# Altium footprint library 2019-10-13_10-42-52.PcbLib: 3 footprints
Each footprint in its own frame and in the unit in brackets; x right, y up, seen from the top. Pads: shape width x height; smd on the part's side, far side on the other; paste and mask are expansions set on the pad; w line width, h text height; cw(c..) or ccw(c..) is an arc to the next point about the centre after c.
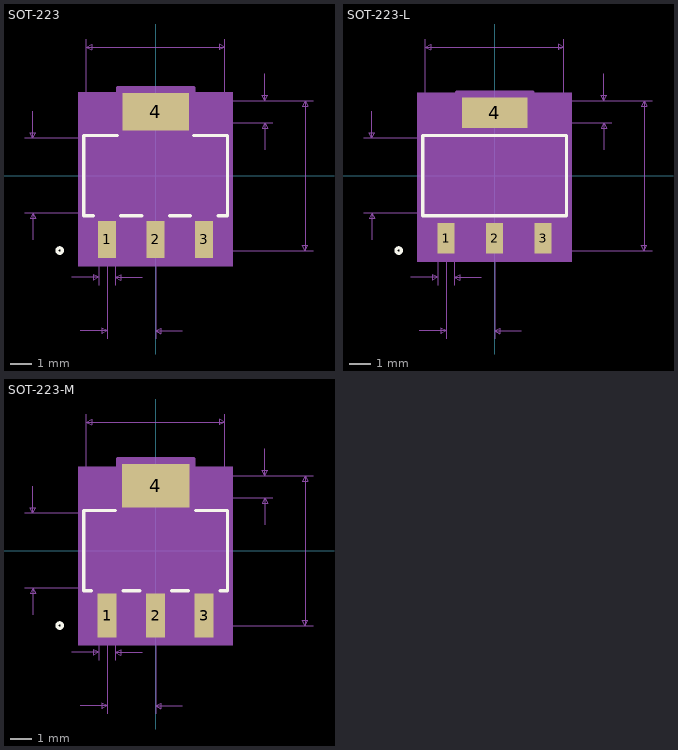
[diagram p0: the footprints below, top view; thin cyan lines are the x and y axes]

## SOT-223 [mm]
pads (4):
  rect 0.851x1.761 smd paste+0 mask+0: 1(-2.3,-3.025) 2(0,-3.025) 3(2.3,-3.025)
  rect 3.151x1.761 smd paste+0 mask+0: 4(0,3.025)
Top Overlay:
  circle w0.152: c-4.545,-3.55 r0.127
  lines w0.152: -2.953,-1.902 -3.402,-1.902 -3.402,1.902 -1.803,1.902 ; -1.647,-1.902 -0.653,-1.902 ; 0.653,-1.902 1.647,-1.902 ; 1.803,1.902 3.402,1.902 3.402,-1.902 2.953,-1.902
Mechanical 5:
  region: -3.656,3.956 3.656,3.956 3.656,-4.287 -3.656,-4.287
Mechanical 7:
  lines w0.025: -6.196,-1.775 0,-1.775 ; -6.196,1.775 0,1.775 ; -5.815,-3.045 -5.815,-1.775 ; -5.815,3.045 -5.815,1.775 ; -3.97,-4.82 -2.7,-4.82 ; -3.57,-7.36 -2.3,-7.36 ; -3.275,1.775 -3.275,6.471 ; -2.7,-5.201 -2.7,-3.55 ; -2.3,-7.741 -2.3,-3.55 ; -1.9,-5.201 -1.9,-3.55 ; -0.63,-4.82 -1.9,-4.82 ; 0,-7.741 0,-3.55 7.466,-3.55 ; 0,2.5 5.561,2.5 ; 1.27,-7.36 0,-7.36 ; 3.275,1.775 3.275,6.471 ; 5.18,1.23 5.18,2.5 ; 5.18,4.82 5.18,3.55 ; 5.561,3.55 0,3.55 7.466,3.55 ; -5.815,-1.775 -5.942,-2.029 -5.688,-2.029 -5.815,-1.775 ; -5.815,1.775 -5.942,2.029 -5.688,2.029 -5.815,1.775 ; -3.275,6.09 3.275,6.09 ; -3.275,6.09 -3.021,6.217 -3.021,5.963 -3.275,6.09 ; -2.7,-4.82 -2.954,-4.693 -2.954,-4.947 -2.7,-4.82 ; -2.3,-7.36 -2.554,-7.233 -2.554,-7.487 -2.3,-7.36 ; -1.9,-4.82 -1.646,-4.693 -1.646,-4.947 -1.9,-4.82 ; 0,-7.36 0.254,-7.233 0.254,-7.487 0,-7.36 ; 3.275,6.09 3.021,6.217 3.021,5.963 3.275,6.09 ; 5.18,2.5 5.053,2.246 5.307,2.246 5.18,2.5 ; 5.18,3.55 5.053,3.804 5.307,3.804 5.18,3.55 ; 7.085,-3.55 7.085,3.55 ; 7.085,-3.55 6.958,-3.296 7.212,-3.296 7.085,-3.55 ; 7.085,3.55 6.958,3.296 7.212,3.296 7.085,3.55
  text "Default Pin Padstyle: RX33p5Y69p34D0T" at -11.747,-11.526 h1.27
  text "Alt 1 Padstyle: OX60Y90D30P" at -8.572,-12.796 h1.27
  text "Alt 2 Padstyle: OX90Y60D30P" at -8.572,-14.066 h1.27
  text "0.28in/7.1mm" at 7.593,-0.318 h0.64
  text "0.041in/1.05mm" at 5.688,2.708 h0.64
  text "0.091in/2.3mm" at -3.214,-8.503 h0.64
  text "0.031in/0.8mm" at -4.364,-5.963 h0.64
  text "0.258in/6.55mm" at -2.222,6.598 h0.64
  text "0.14in/3.55mm" at -10.45,-0.318 h0.64
Mechanical 13:
  circle w0: c-3.021,-1.521 r0.127
  lines w0.025: -3.275,-1.775 3.275,-1.775 3.275,1.775 -3.275,1.775 -3.275,-1.775 ; -2.7,-3.55 -2.7,-1.775 -1.9,-1.775 -1.9,-3.55 -2.7,-3.55 ; -1.55,1.775 1.55,1.775 1.55,3.55 -1.55,3.55 -1.55,1.775 ; -0.4,-3.55 -0.4,-1.775 0.4,-1.775 0.4,-3.55 -0.4,-3.55 ; 1.9,-3.55 1.9,-1.775 2.7,-1.775 2.7,-3.55 1.9,-3.55
Mechanical 15:
  region: -3.529,-2.029 -3.529,2.029 -1.804,2.029 -1.804,4.16 1.804,4.16 1.804,2.029 3.529,2.029 3.529,-2.029 2.954,-2.029 2.954,-4.16 -2.954,-4.16 -2.954,-2.029
  lines w0.152: -3.529,-2.029 -3.529,2.029 -1.804,2.029 -1.804,4.16 1.804,4.16 1.804,2.029 3.529,2.029 3.529,-2.029 2.954,-2.029 2.954,-4.16 -2.954,-4.16 -2.954,-2.029 -3.529,-2.029
3D body: height 0.25, standoff 0, extent 0,0 0.254,0.254

## SOT-223-L [mm]
pads (4):
  rect 0.8x1.456 smd paste+0 mask+0: 1(-2.3,-2.974) 2(0,-2.974) 3(2.3,-2.974)
  rect 3.1x1.456 smd paste+0 mask+0: 4(0,2.974)
Top Overlay:
  circle w0.152: c-4.545,-3.55 r0.127
  lines w0.152: -3.402,-1.902 3.402,-1.902 3.402,1.902 -3.402,1.902 -3.402,-1.902
Mechanical 5:
  region: -3.656,3.931 3.656,3.931 3.656,-4.083 -3.656,-4.083
Mechanical 7:
  lines w0.025: -6.196,-1.775 0,-1.775 ; -6.196,1.775 0,1.775 ; -5.815,-3.045 -5.815,-1.775 ; -5.815,3.045 -5.815,1.775 ; -3.97,-4.82 -2.7,-4.82 ; -3.57,-7.36 -2.3,-7.36 ; -3.275,1.775 -3.275,6.471 ; -2.7,-5.201 -2.7,-3.55 ; -2.3,-7.741 -2.3,-3.55 ; -1.9,-5.201 -1.9,-3.55 ; -0.63,-4.82 -1.9,-4.82 ; 0,-7.741 0,-3.55 7.466,-3.55 ; 0,2.5 5.561,2.5 ; 1.27,-7.36 0,-7.36 ; 3.275,1.775 3.275,6.471 ; 5.18,1.23 5.18,2.5 ; 5.18,4.82 5.18,3.55 ; 5.561,3.55 0,3.55 7.466,3.55 ; -5.815,-1.775 -5.942,-2.029 -5.688,-2.029 -5.815,-1.775 ; -5.815,1.775 -5.942,2.029 -5.688,2.029 -5.815,1.775 ; -3.275,6.09 3.275,6.09 ; -3.275,6.09 -3.021,6.217 -3.021,5.963 -3.275,6.09 ; -2.7,-4.82 -2.954,-4.693 -2.954,-4.947 -2.7,-4.82 ; -2.3,-7.36 -2.554,-7.233 -2.554,-7.487 -2.3,-7.36 ; -1.9,-4.82 -1.646,-4.693 -1.646,-4.947 -1.9,-4.82 ; 0,-7.36 0.254,-7.233 0.254,-7.487 0,-7.36 ; 3.275,6.09 3.021,6.217 3.021,5.963 3.275,6.09 ; 5.18,2.5 5.053,2.246 5.307,2.246 5.18,2.5 ; 5.18,3.55 5.053,3.804 5.307,3.804 5.18,3.55 ; 7.085,-3.55 7.085,3.55 ; 7.085,-3.55 6.958,-3.296 7.212,-3.296 7.085,-3.55 ; 7.085,3.55 6.958,3.296 7.212,3.296 7.085,3.55
  text "Default Pin Padstyle: RX31p5Y57p34D0T" at -11.747,-11.322 h1.27
  text "Alt 1 Padstyle: OX60Y90D30P" at -8.572,-12.592 h1.27
  text "Alt 2 Padstyle: OX90Y60D30P" at -8.572,-13.862 h1.27
  text "0.28in/7.1mm" at 7.593,-0.318 h0.64
  text "0.041in/1.05mm" at 5.688,2.708 h0.64
  text "0.091in/2.3mm" at -3.214,-8.503 h0.64
  text "0.031in/0.8mm" at -4.364,-5.963 h0.64
  text "0.258in/6.55mm" at -2.222,6.598 h0.64
  text "0.14in/3.55mm" at -10.45,-0.318 h0.64
Mechanical 13:
  circle w0: c-3.021,-1.521 r0.127
  lines w0.025: -3.275,-1.775 3.275,-1.775 3.275,1.775 -3.275,1.775 -3.275,-1.775 ; -2.7,-3.55 -2.7,-1.775 -1.9,-1.775 -1.9,-3.55 -2.7,-3.55 ; -1.55,1.775 1.55,1.775 1.55,3.55 -1.55,3.55 -1.55,1.775 ; -0.4,-3.55 -0.4,-1.775 0.4,-1.775 0.4,-3.55 -0.4,-3.55 ; 1.9,-3.55 1.9,-1.775 2.7,-1.775 2.7,-3.55 1.9,-3.55
Mechanical 15:
  region: -3.529,-2.029 -3.529,2.029 -1.804,2.029 -1.804,3.956 1.804,3.956 1.804,2.029 3.529,2.029 3.529,-2.029 2.954,-2.029 2.954,-3.956 -2.954,-3.956 -2.954,-2.029
  lines w0.152: -3.529,-2.029 -3.529,2.029 -1.804,2.029 -1.804,3.956 1.804,3.956 1.804,2.029 3.529,2.029 3.529,-2.029 2.954,-2.029 2.954,-3.956 -2.954,-3.956 -2.954,-2.029 -3.529,-2.029
3D body: height 0.25, standoff 0, extent 0,0 0.254,0.254

## SOT-223-M [mm]
pads (4):
  rect 0.902x2.066 smd paste+0 mask+0: 1(-2.3,-3.076) 2(0,-3.076) 3(2.3,-3.076)
  rect 3.202x2.066 smd paste+0 mask+0: 4(0,3.076)
Top Overlay:
  circle w0.152: c-4.545,-3.55 r0.127
  lines w0.152: -3.052,-1.902 -3.402,-1.902 -3.402,1.902 -1.902,1.902 ; -1.548,-1.902 -0.752,-1.902 ; 0.752,-1.902 1.548,-1.902 ; 1.902,1.902 3.402,1.902 3.402,-1.902 3.052,-1.902
Mechanical 5:
  region: -3.656,3.982 3.656,3.982 3.656,-4.49 -3.656,-4.49
Mechanical 7:
  lines w0.025: -6.196,-1.775 0,-1.775 ; -6.196,1.775 0,1.775 ; -5.815,-3.045 -5.815,-1.775 ; -5.815,3.045 -5.815,1.775 ; -3.97,-4.82 -2.7,-4.82 ; -3.57,-7.36 -2.3,-7.36 ; -3.275,1.775 -3.275,6.471 ; -2.7,-5.201 -2.7,-3.55 ; -2.3,-7.741 -2.3,-3.55 ; -1.9,-5.201 -1.9,-3.55 ; -0.63,-4.82 -1.9,-4.82 ; 0,-7.741 0,-3.55 7.466,-3.55 ; 0,2.5 5.561,2.5 ; 1.27,-7.36 0,-7.36 ; 3.275,1.775 3.275,6.471 ; 5.18,1.23 5.18,2.5 ; 5.18,4.82 5.18,3.55 ; 5.561,3.55 0,3.55 7.466,3.55 ; -5.815,-1.775 -5.942,-2.029 -5.688,-2.029 -5.815,-1.775 ; -5.815,1.775 -5.942,2.029 -5.688,2.029 -5.815,1.775 ; -3.275,6.09 3.275,6.09 ; -3.275,6.09 -3.021,6.217 -3.021,5.963 -3.275,6.09 ; -2.7,-4.82 -2.954,-4.693 -2.954,-4.947 -2.7,-4.82 ; -2.3,-7.36 -2.554,-7.233 -2.554,-7.487 -2.3,-7.36 ; -1.9,-4.82 -1.646,-4.693 -1.646,-4.947 -1.9,-4.82 ; 0,-7.36 0.254,-7.233 0.254,-7.487 0,-7.36 ; 3.275,6.09 3.021,6.217 3.021,5.963 3.275,6.09 ; 5.18,2.5 5.053,2.246 5.307,2.246 5.18,2.5 ; 5.18,3.55 5.053,3.804 5.307,3.804 5.18,3.55 ; 7.085,-3.55 7.085,3.55 ; 7.085,-3.55 6.958,-3.296 7.212,-3.296 7.085,-3.55 ; 7.085,3.55 6.958,3.296 7.212,3.296 7.085,3.55
  text "Default Pin Padstyle: RX35p5Y81p34D0T" at -11.747,-11.729 h1.27
  text "Alt 1 Padstyle: OX60Y90D30P" at -8.572,-12.999 h1.27
  text "Alt 2 Padstyle: OX90Y60D30P" at -8.572,-14.269 h1.27
  text "0.28in/7.1mm" at 7.593,-0.318 h0.64
  text "0.041in/1.05mm" at 5.688,2.708 h0.64
  text "0.091in/2.3mm" at -3.214,-8.503 h0.64
  text "0.031in/0.8mm" at -4.364,-5.963 h0.64
  text "0.258in/6.55mm" at -2.222,6.598 h0.64
  text "0.14in/3.55mm" at -10.45,-0.318 h0.64
Mechanical 13:
  circle w0: c-3.021,-1.521 r0.127
  lines w0.025: -3.275,-1.775 3.275,-1.775 3.275,1.775 -3.275,1.775 -3.275,-1.775 ; -2.7,-3.55 -2.7,-1.775 -1.9,-1.775 -1.9,-3.55 -2.7,-3.55 ; -1.55,1.775 1.55,1.775 1.55,3.55 -1.55,3.55 -1.55,1.775 ; -0.4,-3.55 -0.4,-1.775 0.4,-1.775 0.4,-3.55 -0.4,-3.55 ; 1.9,-3.55 1.9,-1.775 2.7,-1.775 2.7,-3.55 1.9,-3.55
Mechanical 15:
  region: -3.529,-2.029 -3.529,2.029 -1.804,2.029 -1.804,4.363 1.804,4.363 1.804,2.029 3.529,2.029 3.529,-2.029 2.954,-2.029 2.954,-4.363 -2.954,-4.363 -2.954,-2.029
  lines w0.152: -3.529,-2.029 -3.529,2.029 -1.804,2.029 -1.804,4.363 1.804,4.363 1.804,2.029 3.529,2.029 3.529,-2.029 2.954,-2.029 2.954,-4.363 -2.954,-4.363 -2.954,-2.029 -3.529,-2.029
3D body: height 0.25, standoff 0, extent 0,0 0.254,0.254